# Altium footprint library RESAD640W45L370D200.PcbLib: 1 footprints
Each footprint in its own frame and in the unit in brackets; x right, y up, seen from the top. Pads: shape width x height; smd on the part's side, far side on the other; paste and mask are expansions set on the pad; w line width, h text height; cw(c..) or ccw(c..) is an arc to the next point about the centre after c.
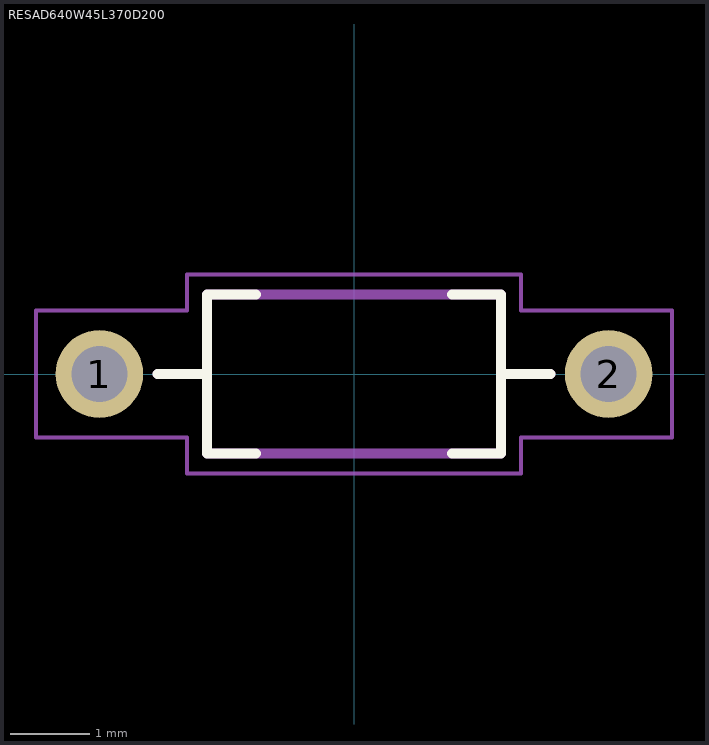
[diagram p0: the footprint, top view; thin cyan lines are the x and y axes]

## RESAD640W45L370D200 [mm]
pads (2):
  round 1.1 hole 0.7: 1(-3.2,0) 2(3.2,0)
Top Overlay:
  lines w0.127: -2.47,0 -1.85,0 ; -1.23,-1 -1.85,-1 -1.85,0 ; -1.23,1 -1.85,1 -1.85,0 ; 1.23,-1 1.85,-1 1.85,0 ; 1.23,1 1.85,1 1.85,0 ; 2.47,0 1.85,0
Assembly Top:
  lines w0.127: -2.47,0 -1.85,0 ; 2.47,0 1.85,0 ; -1.85,0 -1.85,1 1.85,1 1.85,0 ; -1.85,0 -1.85,-1 1.85,-1 1.85,0
Courtyard Top:
  lines w0.05: -4,-0.8 -2.1,-0.8 -2.1,-1.25 2.1,-1.25 2.1,-0.8 4,-0.8 4,0.8 2.1,0.8 2.1,1.25 -2.1,1.25 -2.1,0.8 -4,0.8 -4,-0.8
3D body "step_temp.STEP": height 2, standoff -3.6, extent -3.425,-0.998 3.425,0.999